# Altium footprint library KF126-3P.PcbLib: 1 footprints
Each footprint in its own frame and in the unit in brackets; x right, y up, seen from the top. Pads: shape width x height; smd on the part's side, far side on the other; paste and mask are expansions set on the pad; w line width, h text height; cw(c..) or ccw(c..) is an arc to the next point about the centre after c.
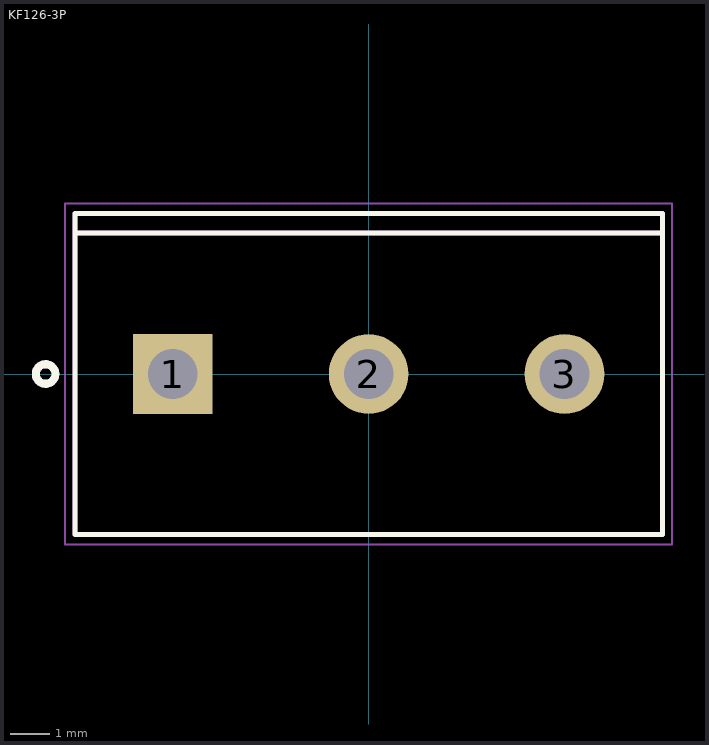
[diagram p0: the footprint, top view; thin cyan lines are the x and y axes]

## KF126-3P [mil] "KF126-3P"
pads (3):
  rect 80x80 hole 50: 1(-196.85,0)
  round 80 hole 50: 2(0,0) 3(196.85,0)
Top Overlay:
  circle w8: c-324.8,0 r9.84
  lines w5: -295.28,141.73 295.28,141.73 ; 295.28,141.73 295.28,-161.42 -295.28,-161.42 -295.28,161.42 295.28,161.42 295.28,141.73
Mechanical 13:
  circle w8: c-324.8,0 r9.84
  lines w5: -295.28,141.73 295.28,141.73 ; 295.28,141.73 295.28,-161.42 -295.28,-161.42 -295.28,161.42 295.28,161.42 295.28,141.73
Mechanical 15:
  lines w1.97: -305.12,-171.26 -305.12,171.26 305.12,171.26 305.12,-171.26 -305.12,-171.26
3D body "KF126-3P.STEP": height 394.85, standoff -136.65, extent -318.9,-160 295.28,162.83